# Altium schematic symbol library MAX485CSA.SchLib: 1 symbol
Pins are listed as number, name and electrical type; pins without a type are passive.

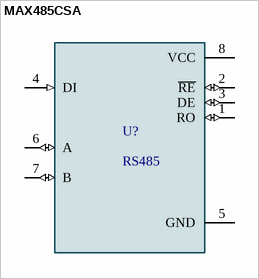
[diagram p0: symbol MAX485CSA]

## MAX485CSA
designator U?, comment RS485
1/1 Transceiver Half RS422, RS485 8-SOIC; MP: MAX485CSA; Package: None; Value: RS485; Price: None; Availability: Unavailable
footprint MAX485 (SOIC127P600X175-8N)
pins: 1 RO (io), 2 ~{RE} (io), 3 DE (io), 4 DI (in), 5 GND, 6 A (io), 7 B (io), 8 VCC (power)